# Altium footprint library Turret.PcbLib: 21 footprints (part 1 of 2)
Each footprint in its own frame and in the unit in brackets; x right, y up, seen from the top. Pads: shape width x height; smd on the part's side, far side on the other; paste and mask are expansions set on the pad; w line width, h text height; cw(c..) or ccw(c..) is an arc to the next point about the centre after c.
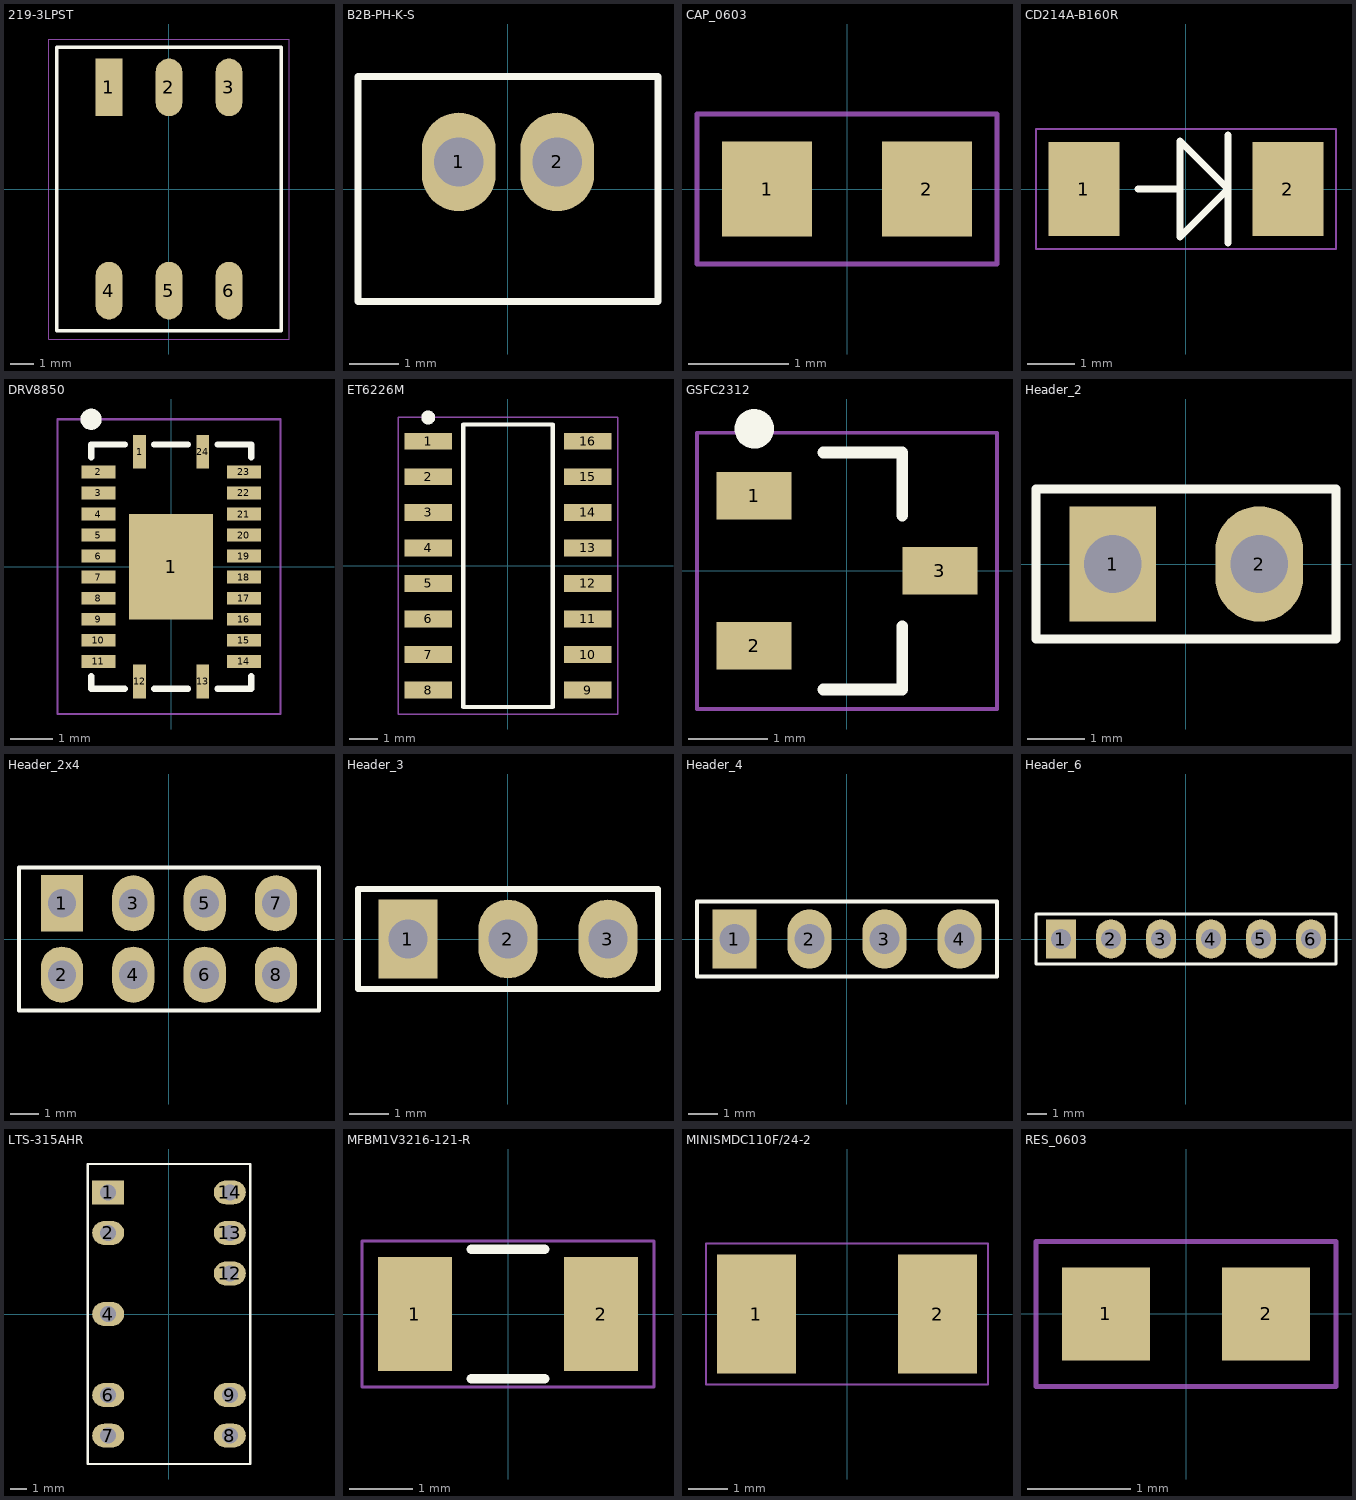
[diagram p0: the footprints below, top view; thin cyan lines are the x and y axes]

## 219-3LPST [mm]
pads (6):
  rect 1.13x2.44 smd: 1(-2.54,4.3)
  oval 1.13x2.44 smd: 2(0,4.3) 3(2.54,4.3) 4(-2.54,-4.3) 5(0,-4.3) 6(2.54,-4.3)
Top Overlay:
  lines w0.15: -4.75,-6 -4.75,6 4.75,6 4.75,-6 -4.75,-6
Mechanical 15:
  lines w0.05: -5.08,-6.35 -5.08,6.35 5.08,6.35 5.08,-6.35 -5.08,-6.35
3D body "DIP_3.step": height 4.3, standoff 0, extent -4.545,-4.955 4.545,4.955

## B2B-PH-K-S [mm]
pads (2):
  oval 1.5x2 hole 1 paste-2539.97 mask+0: 1(-1,0.55) 2(1,0.55)
Top Overlay:
  lines w0.15: -3.048,-2.286 3.048,-2.286 3.048,2.286 -3.048,2.286 -3.048,-2.286
Mechanical 15:
  lines w0.05: -3.048,-2.286 3.048,-2.286 3.048,2.286 -3.048,2.286 -3.048,-2.286
3D body "B2B-PH-K-S.STEP": height 6, standoff -3.4, extent -2.95,-2.25 2.95,2.25

## CAP_0603 [mm]
pads (2):
  rect 0.9x0.95 smd: 1(-0.8,0) 2(0.8,0)
Mechanical 15:
  lines w0.05: -1.5,-0.75 -1.5,0.75 1.5,0.75 1.5,-0.75 -1.5,-0.75
3D body "CAPC1608X06N.step": height 0.55, standoff 0, extent -0.85,-0.45 0.85,0.45

## CD214A-B160R [mm]
pads (2):
  rect 1.5x2 smd: 1(-2.159,0) 2(2.159,0)
Top Overlay:
  lines w0.15: -1.016,0 -0.127,0 ; 0.889,-1.143 0.889,1.143 ; -0.127,-1.016 -0.127,1.016 0.889,0 -0.127,-1.016
Mechanical 15:
  lines w0.05: -3.175,-1.27 3.175,-1.27 3.175,1.27 -3.175,1.27 -3.175,-1.27
3D body "CD214A-BxR.stp": height 1, standoff 0.04, extent -2.253,-1.1 2.25,1.1

## DRV8850 [mm]
pads (25):
  rect 0.305x0.805 smd mask+0.05: 1(-0.75,2.727) 12(-0.75,-2.727) 13(0.75,-2.727) 24(0.75,2.727)
  rect 2x2.5 smd paste+0 mask+0.05: 1(0,0)
  rect 0.805x0.305 smd mask+0.05: 2(-1.727,2.25) 3(-1.727,1.75) 4(-1.727,1.25) 5(-1.727,0.75) 6(-1.727,0.25) 7(-1.727,-0.25) 8(-1.727,-0.75) 9(-1.727,-1.25) 10(-1.727,-1.75) 11(-1.727,-2.25) 14(1.727,-2.25) 15(1.727,-1.75) 16(1.727,-1.25) 17(1.727,-0.75) 18(1.727,-0.25) 19(1.727,0.25) 20(1.727,0.75) 21(1.727,1.25) 22(1.727,1.75) 23(1.727,2.25)
Top Overlay:
  circle w0.25: c-1.9,3.5 r0.125
  lines w0.15: -1.9,-2.6 -1.9,-2.9 -1.1,-2.9 ; -1.9,2.6 -1.9,2.9 -1.1,2.9 ; -0.4,-2.9 0.4,-2.9 ; -0.4,2.9 0.4,2.9 ; 1.1,-2.9 1.9,-2.9 1.9,-2.6 ; 1.1,2.9 1.9,2.9 1.9,2.6
Top Paste:
  rectangle: 0.1,-1.1 0.9,-0.1
  rectangle: -0.9,-1.1 -0.1,-0.1
  rectangle: 0.1,0.1 0.9,1.1
  rectangle: -0.9,0.1 -0.1,1.1
Mechanical 15:
  lines w0.05: -2.7,-3.5 -2.7,3.5 2.6,3.5 2.6,-3.5 0,-3.5 -2.7,-3.5
3D body "RGY_24.step": height 1.4, standoff 0, extent -1.825,-2.825 1.825,2.825

## ET6226M [mm] "TSOP, 16-Leads, Body 10,00x3,95mm, Pitch 1,27mm, IPC Medium Density"
height 1.55
pads (16):
  rect 1.7x0.6 smd: 1(-2.85,4.445) 2(-2.85,3.175) 3(-2.85,1.905) 4(-2.85,0.635) 5(-2.85,-0.635) 6(-2.85,-1.905) 7(-2.85,-3.175) 8(-2.85,-4.445) 9(2.85,-4.445) 10(2.85,-3.175) 11(2.85,-1.905) 12(2.85,-0.635) 13(2.85,0.635) 14(2.85,1.905) 15(2.85,3.175) 16(2.85,4.445)
Top Overlay:
  circle w0.25: c-2.85,5.295 r0.125
  lines w0.15: -1.6,-5.05 -1.6,5.05 1.6,5.05 1.6,-5.05 -1.6,-5.05
Mechanical 15:
  lines w0.05: -3.925,-5.3 -3.925,5.3 3.925,5.3 3.925,-5.3 -3.925,-5.3
3D body "TSOP127P600X155-16N.step": height 1.55, standoff 0, extent -3.02,-5.05 3.02,5.05

## GSFC2312 [mm] "SOT23, 3-Leads, Body 2,90x2,40mm, Pitch 0,95mm, IPC Medium Density"
height 1.15
pads (3):
  rect 0.95x0.6 smd: 1(-1.175,0.95) 2(-1.175,-0.95) 3(1.175,0)
Top Overlay:
  circle w0.25: c-1.175,1.8 r0.125
  lines w0.15: -0.3,-1.5 0.7,-1.5 0.7,-0.7 ; -0.3,1.5 0.7,1.5 0.7,0.7
Mechanical 15:
  lines w0.05: -1.9,-1.75 1.9,-1.75 1.9,1.75 -1.9,1.75 -1.9,-1.75
3D body "SOT95P240X115-3N.step": height 1.15, standoff 0, extent -1.275,-1.5 1.275,1.5

## Header_2 [mm]
pads (2):
  rect 1.5x2 hole 1: 1(-1.27,0)
  oval 1.524x2 hole 1: 2(1.27,0)
Top Overlay:
  lines w0.15: -2.6,-1.3 2.6,-1.3 2.6,1.3 -2.6,1.3 -2.6,-1.3
Mechanical 15:
  lines w0.05: -2.6,-1.3 2.6,-1.3 2.6,1.3 -2.6,1.3 -2.6,-1.3
3D body "Header2.step": height 8.54, standoff -3, extent -2.54,-1.27 2.54,1.27

## Header_2x4 [mm]
pads (8):
  rect 1.5x2 hole 1: 1(-3.81,1.27)
  oval 1.5x2 hole 1: 2(-3.81,-1.27) 3(-1.27,1.27) 4(-1.27,-1.27) 5(1.27,1.27) 6(1.27,-1.27) 7(3.81,1.27) 8(3.81,-1.27)
Top Overlay:
  lines w0.15: -5.334,-2.54 5.334,-2.54 5.334,2.54 -5.334,2.54 -5.334,-2.54
Mechanical 15:
  lines w0.05: -5.334,-2.54 5.334,-2.54 5.334,2.54 -5.334,2.54 -5.334,-2.54
3D body "PPPC042LFBN-RC.STEP": height 8.51, standoff -3.2, extent -5.334,-2.54 5.334,2.54

## Header_3 [mm]
pads (3):
  rect 1.5x2 hole 1: 1(-2.54,0)
  oval 1.5x2 hole 1: 2(0,0) 3(2.54,0)
Top Overlay:
  lines w0.15: -3.81,-1.27 3.81,-1.27 3.81,1.27 -3.81,1.27 -3.81,-1.27
Mechanical 15:
  lines w0.05: -3.81,-1.27 3.81,-1.27 3.81,1.27 -3.81,1.27 -3.81,-1.27
3D body "Header3.step": height 8.54, standoff -3, extent -3.81,-1.27 3.81,1.27

## Header_4 [mm]
pads (4):
  rect 1.5x2 hole 1: 1(-3.81,0)
  oval 1.5x2 hole 1: 2(-1.27,0) 3(1.27,0) 4(3.81,0)
Top Overlay:
  lines w0.15: -5.08,-1.27 5.08,-1.27 5.08,1.27 -5.08,1.27 -5.08,-1.27
Mechanical 15:
  lines w0.05: -5.08,-1.27 5.08,-1.27 5.08,1.27 -5.08,1.27 -5.08,-1.27
3D body "Header4.step": height 8.54, standoff -3, extent -5.08,-1.278 5.08,1.262

## Header_6 [mm]
pads (6):
  rect 1.5x2 hole 1: 1(-6.35,0)
  oval 1.5x2 hole 1: 2(-3.81,0) 3(-1.27,0) 4(1.27,0) 5(3.81,0) 6(6.35,0)
Top Overlay:
  lines w0.15: -7.62,-1.27 7.62,-1.27 7.62,1.27 -7.62,1.27 -7.62,-1.27
Mechanical 15:
  lines w0.05: -7.62,-1.27 7.62,-1.27 7.62,1.27 -7.62,1.27 -7.62,-1.27
3D body "Header6.step": height 8.54, standoff -3, extent -7.62,-1.27 7.62,1.27

## LTS-315AHR [mm]
pads (10):
  rect 2x1.5 hole 1: 1(-3.81,7.62)
  oval 2x1.5 hole 1: 2(-3.81,5.08) 4(-3.81,0) 6(-3.81,-5.08) 7(-3.81,-7.62) 8(3.81,-7.62) 9(3.81,-5.08) 12(3.81,2.54) 13(3.81,5.08) 14(3.81,7.62)
Top Overlay:
  lines w0.15: -5.08,-9.398 5.08,-9.398 5.08,9.398 -5.08,9.398 -5.08,-9.398
Mechanical 15:
  lines w0.05: -5.08,-9.398 5.08,-9.398 5.08,9.398 -5.08,9.398 -5.08,-9.398
3D body "Sept_Segments v1.step": height 5.16, standoff -3.8, extent -4.922,-9.35 4.928,9.4

## MFBM1V3216-121-R [mil]
pads (2):
  rect 46x71 smd paste+0 mask+0: 1(-58,0) 2(58,0)
Top Overlay:
  lines w5.91: -22.89,-40.5 22.89,-40.5 ; -22.89,40.5 22.89,40.5
Mechanical 15:
  lines w1.97: -91,-45.5 91,-45.5 91,45.5 -91,45.5 -91,-45.5
3D body "IND_MFBM1V3216-xxx-R_EAT.step": height 42.99, standoff 0, extent -67.01,-35.51 67.01,35.51

## MINISMDC110F/24-2 [mm]
pads (2):
  rect 2x3 smd: 1(-2.286,0) 2(2.286,0)
Mechanical 15:
  lines w0.05: -3.556,-1.778 3.556,-1.778 3.556,1.778 -3.556,1.778 -3.556,-1.778
3D body "Polyswitch1.1A.step": height 1.46, standoff 0, extent -2.415,-1.705 2.415,1.705

## RES_0603 [mm]
pads (2):
  rect 0.85x0.9 smd: 1(-0.775,0) 2(0.775,0)
Mechanical 15:
  lines w0.05: -1.45,-0.7 -1.45,0.7 1.45,0.7 1.45,-0.7 -1.45,-0.7
3D body "RESC1608X06N.step": height 0.55, standoff 0, extent -0.85,-0.45 0.85,0.45